# Altium footprint library DFN8_3x3_0.65.PcbLib: 1 footprints
Each footprint in its own frame and in the unit in brackets; x right, y up, seen from the top. Pads: shape width x height; smd on the part's side, far side on the other; paste and mask are expansions set on the pad; w line width, h text height; cw(c..) or ccw(c..) is an arc to the next point about the centre after c.
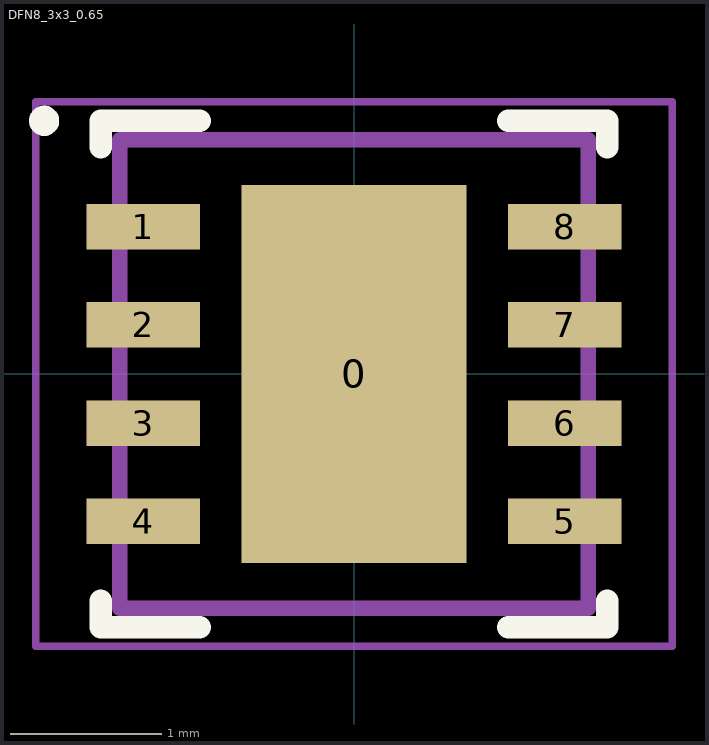
[diagram p0: the footprint, top view; thin cyan lines are the x and y axes]

## DFN8_3x3_0.65 [mm] "SON, 8-Leads, Body 3.00x3.00mm, Pitch 0.65mm, Thermal Pad 2.50x1.49mm, IPC Medium Density"
height 0.8
pads (9):
  rect 1.49x2.5 smd: 0(0,0)
  rect 0.75x0.3 smd: 1(-1.395,0.975) 2(-1.395,0.325) 3(-1.395,-0.325) 4(-1.395,-0.975) 5(1.395,-0.975) 6(1.395,-0.325) 7(1.395,0.325) 8(1.395,0.975)
Top Overlay:
  circle w0.1: c-2.05,1.675 r0.05
  lines w0.15: -1.675,-1.5 -1.675,-1.675 -1.02,-1.675 ; -1.675,1.5 -1.675,1.675 -1.02,1.675 ; 1.02,-1.675 1.675,-1.675 1.675,-1.5 ; 1.02,1.675 1.675,1.675 1.675,1.5
Mechanical 13:
  lines w0.1: -1.55,-1.55 1.55,-1.55 1.55,1.55 -1.55,1.55 -1.55,-1.55
Mechanical 15:
  lines w0.05: -2.105,-1.8 2.105,-1.8 2.105,1.8 -2.105,1.8 -2.105,-1.8
  lines w0.1: -0.5,0 0.5,0 ; 0,-0.5 0,0.5
3D body "SON65P300X80_HS-9N.step": height 0.8, standoff 0, extent -1.6,-1.55 1.6,1.55